# Altium footprint library F101S3_KSDIY_V2.PcbLib: 29 footprints (part 1 of 2)
Each footprint in its own frame and in the unit in brackets; x right, y up, seen from the top. Pads: shape width x height; smd on the part's side, far side on the other; paste and mask are expansions set on the pad; w line width, h text height; cw(c..) or ccw(c..) is an arc to the next point about the centre after c.
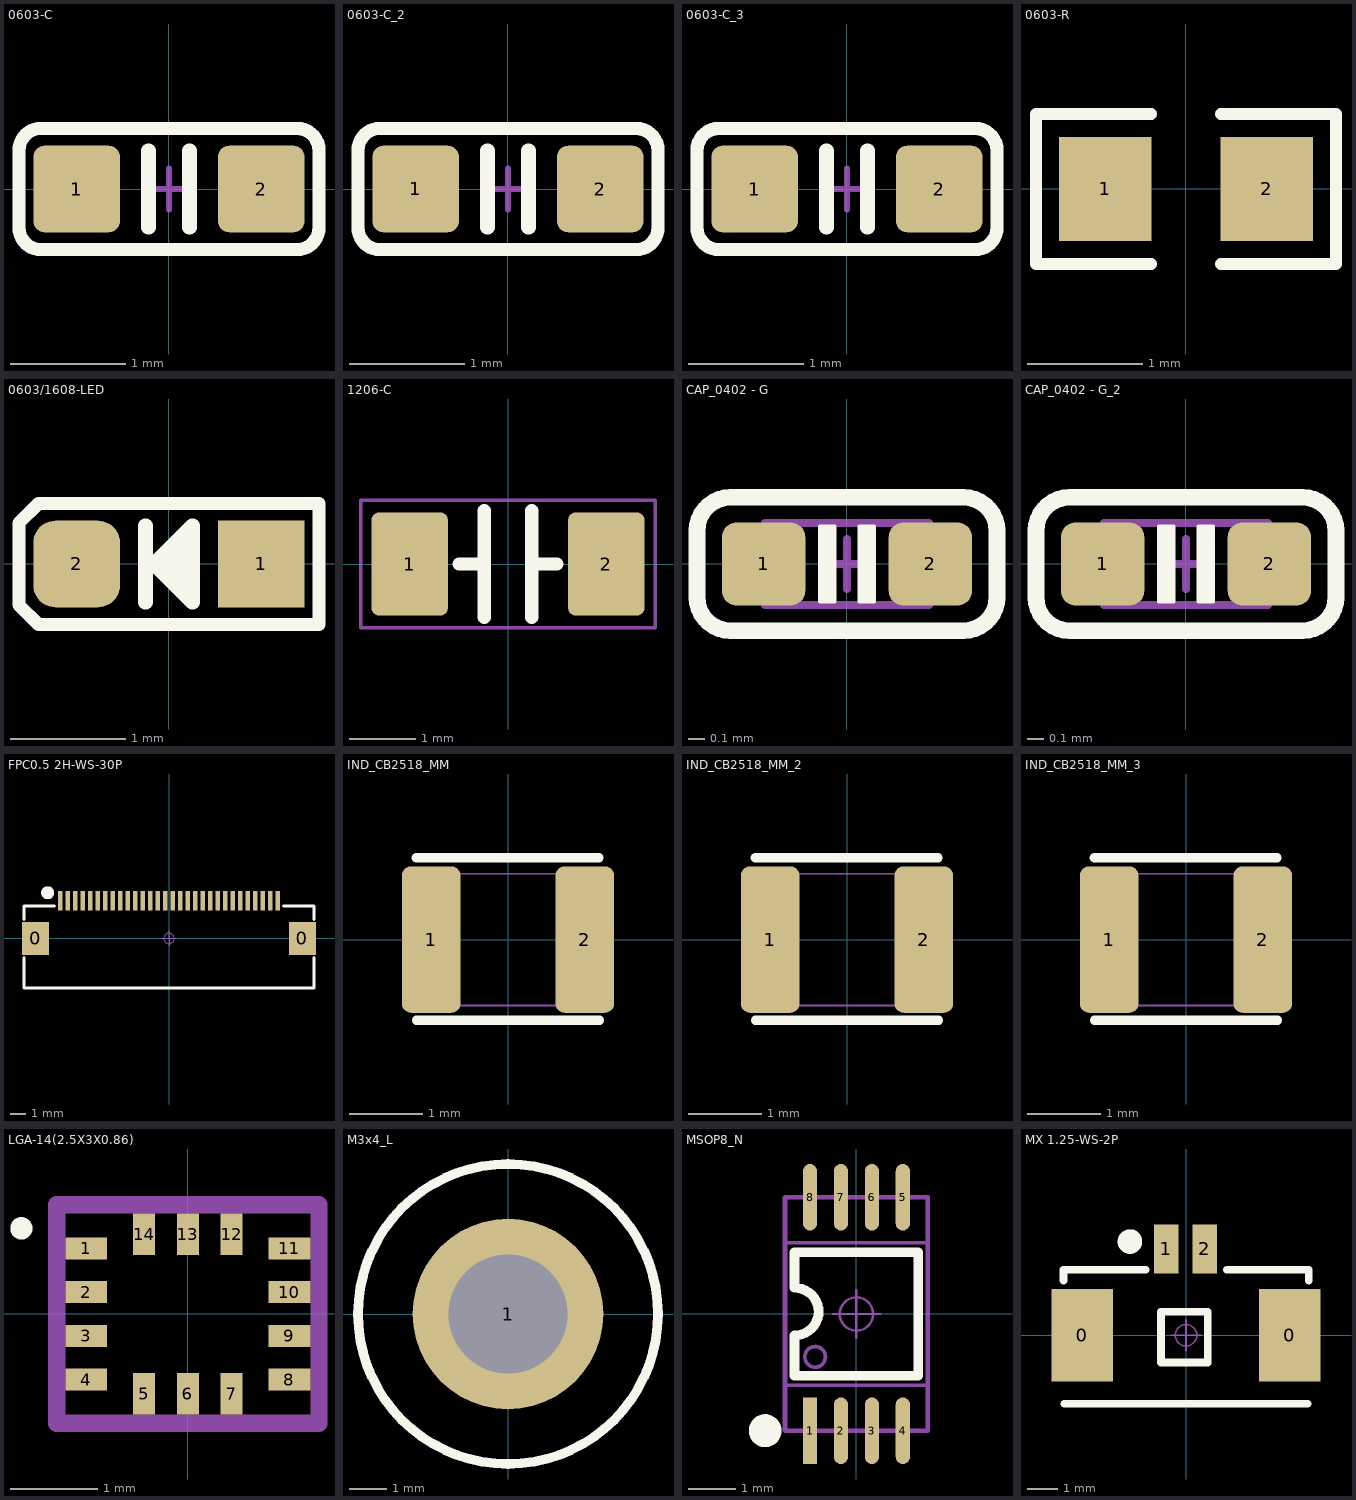
[diagram p0: the footprints below, top view; thin cyan lines are the x and y axes]

## 0603-C [mm] "Murata & TDK 0603,25V,±10%,X7R,SERAMIC"
height 45
pads (2):
  rrect25% 0.75x0.75 smd paste+0 mask+0.051: 1(-0.8,0) 2(0.8,0)
Top Overlay:
  lines w0.114: -1.3,-0.335 ccw(c-1.109,-0.335) -1.109,-0.526 1.11,-0.526 ccw(c1.11,-0.335) 1.3,-0.335 1.3,0.335 ccw(c1.11,0.335) 1.109,0.526 -1.109,0.526 ccw(c-1.109,0.335) -1.3,0.335 -1.3,-0.335
  lines w0.127: -0.178,-0.33 -0.178,0.33 ; 0.178,-0.33 0.178,0.33
Mechanical 15:
  lines w0.051: -0.178,0 0.178,0 ; 0,-0.178 0,0.178
3D body "0603c.stp": height 0.8, standoff 0, extent -0.8,-0.406 0.8,0.394

## 0603-C_2 [mm]
pads (2):
  rrect25% 0.75x0.75 smd paste+0 mask+0.051: 1(-0.8,0) 2(0.8,0)
Top Overlay:
  lines w0.114: -1.3,-0.335 ccw(c-1.109,-0.335) -1.109,-0.526 1.11,-0.526 ccw(c1.11,-0.335) 1.3,-0.335 1.3,0.335 ccw(c1.11,0.335) 1.109,0.526 -1.109,0.526 ccw(c-1.109,0.335) -1.3,0.335 -1.3,-0.335
  lines w0.127: -0.178,-0.33 -0.178,0.33 ; 0.178,-0.33 0.178,0.33
Mechanical 15:
  lines w0.051: -0.178,0 0.178,0 ; 0,-0.178 0,0.178
3D body "0603c.stp": height 0.8, standoff 0, extent -0.8,-0.406 0.8,0.394

## 0603-C_3 [mm]
pads (2):
  rrect25% 0.75x0.75 smd paste+0 mask+0.051: 1(-0.8,0) 2(0.8,0)
Top Overlay:
  lines w0.114: -1.3,-0.335 ccw(c-1.109,-0.335) -1.109,-0.526 1.11,-0.526 ccw(c1.11,-0.335) 1.3,-0.335 1.3,0.335 ccw(c1.11,0.335) 1.109,0.526 -1.109,0.526 ccw(c-1.109,0.335) -1.3,0.335 -1.3,-0.335
  lines w0.127: -0.178,-0.33 -0.178,0.33 ; 0.178,-0.33 0.178,0.33
Mechanical 15:
  lines w0.051: -0.178,0 0.178,0 ; 0,-0.178 0,0.178
3D body "0603c.stp": height 0.8, standoff 0, extent -0.8,-0.406 0.8,0.394

## 0603-R [mm] "Chip Capacitor; Body 1.6 x 0.8 mm (LxW typ)"
height 1.35
pads (2):
  rect 0.8x0.9 smd: 1(-0.7,0) 2(0.7,0)
Top Overlay:
  lines w0.1: -0.3,-0.65 -1.3,-0.65 -1.3,0.65 -0.3,0.65 ; 0.3,-0.65 1.3,-0.65 1.3,0.65 0.3,0.65
3D body "RESC1608(0603).STEP": height 0.38, standoff 0, extent -0.8,-0.4 0.8,0.4

## 0603/1608-LED [mm]
height 3.1
pads (2):
  rect 0.75x0.75 smd mask+0.051: 1(0.8,0)
  rrect50% 0.75x0.75 smd mask+0.051: 2(-0.8,0)
Top Overlay:
  region: -0.127,0 0.203,0.33 0.203,-0.33
  lines w0.114: -1.3,-0.356 -1.3,0.356 -1.13,0.526 1.3,0.526 1.3,-0.526 -1.13,-0.526 -1.3,-0.356
  lines w0.127: -0.203,-0.33 -0.203,0.33 ; -0.127,0 0.203,0.33 0.203,-0.33 -0.127,0
3D body "0603-led-r.stp": height 0.79, standoff 0, extent -0.787,-0.4 0.813,0.4

## 1206-C [mm]
height 45
pads (2):
  rrect20% 1.15x1.55 smd mask+0.051: 1(-1.475,0) 2(1.475,0)
Top Overlay:
  lines w0.2: -0.735,0 -0.354,0 ; -0.354,-0.8 -0.354,0.8 ; 0.354,-0.8 0.354,0.8 ; 0.354,0 0.735,0
Mechanical 15:
  lines w0.05: -2.208,-0.958 -2.208,0.958 2.208,0.958 2.208,-0.958 -2.208,-0.958
3D body "1206-c.stp": height 1.61, standoff 0.01, extent -1.6,-0.8 1.6,0.8

## CAP_0402 - G [mil]
height 21.65
pads (2):
  rrect35% 20x20 smd mask+2: 1(-20,0) 2(20,0)
Top Overlay:
  region: 6.5,-9 3,-9 3,9 6.5,9
  region: -6.5,9 -3,9 -3,-9 -6.5,-9
  lines w1: -6.5,-9 -6.5,9 -3,9 -3,-9 -6.5,-9 ; 3,-9 6.5,-9 6.5,9 3,9 3,-9
  lines w4: -36,-8 ccw(c-28,-8) -28,-16 28,-16 ccw(c28,-8) 36,-8 36,8 ccw(c28,8) 28,16 -28,16 ccw(c-28,8) -36,8 -36,-8
Mechanical 13:
  lines w2: -6,0 6,0 ; 0,-6 0,6 ; -19.68,-9.84 19.69,-9.84 19.69,9.84 -19.68,9.84 -19.68,-9.84
3D body "CAPC1005X05L.step": height 20.18, standoff 0.5, extent -19.68,-9.84 19.69,9.85

## CAP_0402 - G_2 [mil]
pads (2):
  rrect35% 20x20 smd mask+2: 1(-20,0) 2(20,0)
Top Overlay:
  region: 6.5,-9 3,-9 3,9 6.5,9
  region: -6.5,9 -3,9 -3,-9 -6.5,-9
  lines w1: -6.5,-9 -6.5,9 -3,9 -3,-9 -6.5,-9 ; 3,-9 6.5,-9 6.5,9 3,9 3,-9
  lines w4: -36,-8 ccw(c-28,-8) -28,-16 28,-16 ccw(c28,-8) 36,-8 36,8 ccw(c28,8) 28,16 -28,16 ccw(c-28,8) -36,8 -36,-8
Mechanical 13:
  lines w2: -6,0 6,0 ; 0,-6 0,6 ; -19.69,-9.84 19.68,-9.84 19.68,9.84 -19.69,9.84 -19.69,-9.84
3D body "CAPC1005X05L.step": height 20.18, standoff 0.5, extent -19.68,-9.84 19.69,9.85

## FPC0.5 2H-WS-30P [mm] "长：19.2mm，宽：5.2mm，高：2mm"
pads (32):
  rect 1.8x2.2 smd: 0(-8.9,0) 0(8.9,0)
  rect 0.3x1.3 smd: 1(-7.25,2.497) 2(-6.75,2.497) 3(-6.25,2.497) 4(-5.75,2.497) 5(-5.25,2.497) 6(-4.75,2.497) 7(-4.25,2.497) 8(-3.75,2.497) 9(-3.25,2.497) 10(-2.75,2.497) 11(-2.25,2.497) 12(-1.75,2.497) 13(-1.25,2.497) 14(-0.75,2.497) 15(-0.25,2.497) 16(0.25,2.497) 17(0.75,2.497) 18(1.25,2.497) 19(1.75,2.497) 20(2.25,2.497) 21(2.75,2.497) 22(3.25,2.497) 23(3.75,2.497) 24(4.25,2.497) 25(4.75,2.497) 26(5.25,2.497) 27(5.75,2.497) 28(6.25,2.497) 29(6.75,2.497) 30(7.25,2.497)
Top Overlay:
  circle w0.5: c-8.094,3.048 r0.18
  lines w0.2: -9.675,-1.27 -9.675,-3.302 9.675,-3.302 9.675,-1.27 ; -9.675,1.27 -9.675,2.159 -7.643,2.159 ; 7.643,2.159 9.675,2.159 9.675,1.27
Mechanical 15:
  circle w0.05: c0,0 r0.35
  lines w0.05: -0.5,0 0.5,0 ; 0,-0.5 0,0.5
3D body "FPC0.5 2H-S-W-30P.STEP": height 2, standoff -0.01, extent -9.6,-3.15 9.6,2.85

## IND_CB2518_MM [mm] "IND_CB2518_MM"
height 6.5
pads (2):
  rrect30% 0.8x2 smd mask+0.051: 1(-1.05,0) 2(1.05,0)
Top Overlay:
  lines w0.127: -1.255,1.119 1.245,1.119 ; -1.25,-1.103 1.25,-1.103
Mechanical 16:
  lines w0.025: -1.25,-0.9 1.25,-0.9 1.25,0.9 -1.25,0.9 -1.25,-0.9
3D body "ind_cb2518_mm.stp": height 0.85, standoff 0, extent -1.25,-0.9 1.25,0.9

## IND_CB2518_MM_2 [mm]
pads (2):
  rrect30% 0.8x2 smd mask+0.051: 1(-1.05,0) 2(1.05,0)
Top Overlay:
  lines w0.127: -1.255,1.119 1.245,1.119 ; -1.25,-1.103 1.25,-1.103
Mechanical 16:
  lines w0.025: -1.25,-0.9 1.25,-0.9 1.25,0.9 -1.25,0.9 -1.25,-0.9
3D body "ind_cb2518_mm.stp": height 0.85, standoff 0, extent -1.25,-0.9 1.25,0.9

## IND_CB2518_MM_3 [mm]
pads (2):
  rrect30% 0.8x2 smd mask+0.051: 1(-1.05,0) 2(1.05,0)
Top Overlay:
  lines w0.127: -1.255,1.119 1.245,1.119 ; -1.25,-1.103 1.25,-1.103
Mechanical 16:
  lines w0.025: -1.25,-0.9 1.25,-0.9 1.25,0.9 -1.25,0.9 -1.25,-0.9
3D body "ind_cb2518_mm.stp": height 0.85, standoff 0, extent -1.25,-0.9 1.25,0.9

## LGA-14(2.5X3X0.86) [mm]
pads (14):
  rect 0.475x0.25 smd: 1(-1.163,0.75) 2(-1.163,0.25) 3(-1.163,-0.25) 4(-1.163,-0.75) 8(1.162,-0.75) 9(1.162,-0.25) 10(1.162,0.25) 11(1.162,0.75)
  rect 0.25x0.475 smd: 5(-0.5,-0.913) 6(0,-0.913) 7(0.5,-0.913) 12(0.5,0.912) 13(0,0.912) 14(-0.5,0.912)
Top Overlay:
  circle w0.2: c-1.905,0.98 r0.027
Mechanical 13:
  lines w0.2: -1.5,-1.25 -1.5,1.25 1.5,1.25 1.5,-1.25 -1.5,-1.25
3D body "LSM6DS3TR-C.stp": height 0.86, standoff 0, extent -1.5,-1.25 1.5,1.25

## M3x4_L [mm] "M3铜柱，长：4mm"
pads (1):
  round 5.08 hole 3.175: 1(0,0)
Top Overlay:
  circle w0.254: c0,0 r4
3D body "M3x4.STEP": height 4.05, standoff 0.05, extent -2.698,-2.35 2.698,2.35

## MSOP8_N [mm] "塑封体长3mm，宽3mm，脚距0.65"
pads (8):
  rect 0.3x1.4 smd: 1(-0.975,-2.45)
  oval 0.3x1.4 smd: 2(-0.325,-2.45) 3(0.325,-2.45) 4(0.975,-2.45) 5(0.975,2.45) 6(0.325,2.45) 7(-0.325,2.45) 8(-0.975,2.45)
Top Overlay:
  circle w0.381: c-1.917,-2.45 r0.155
  lines w0.2: -1.3,-1.3 1.3,-1.3 1.3,1.3 -1.3,1.3
  lines w0.203: -1.3,-1.3 -1.3,-0.46 ; -1.3,-0.45 ccw(c-1.3,0.058) -0.792,0.058 ; -1.3,0.55 cw(c-1.3,0.042) -0.792,0.042 ; -1.3,0.556 -1.3,1.3
Mechanical 13:
  circle w0.076: c-0.867,-0.9 r0.217
  lines w0.076: -1.5,-1.5 1.5,-1.5 1.5,1.5 -1.5,1.5 -1.5,-1.5
Mechanical 15:
  circle w0.05: c0,0 r0.35
  lines w0.05: -0.5,0 0.5,0 ; 0,-0.5 0,0.5
  lines w0.1: -1.5,-2.45 -1.5,2.45 1.5,2.45 1.5,-2.45 -1.5,-2.45
3D body "MSOP-8.STEP": height 0.95, standoff 0, extent -1.5,-2.45 1.5,2.45

## MX 1.25-WS-2P [mm] "长：7.65mm，宽：4.2mm，高：3.4mm"
pads (4):
  rect 2x3 smd: 0(-3.382,0) 0(3.382,0)
  rect 0.8x1.6 smd: 1(-0.639,2.811) 2(0.611,2.811)
Top Overlay:
  circle w0.4: c-1.824,3.048 r0.2
  lines w0.254: -3.983,1.778 -3.983,2.134 -1.316,2.134 ; -3.956,-2.228 3.951,-2.228 ; 1.328,2.134 3.995,2.134 3.995,1.778 ; -0.814,-0.889 -0.814,0.762 0.71,0.762 0.71,-0.889 -0.814,-0.889
Mechanical 15:
  circle w0.05: c0,0 r0.35
  lines w0.05: -0.5,0 0.5,0 ; 0,-0.5 0,0.5
3D body "MOLEX1.25-WS-2P.STEP": height 3.4, standoff 0, extent -3.825,-2.1 3.825,3.09